# Altium schematic symbol library Displays.SchLib: 4 symbols
Pins are listed as number, name and electrical type; pins without a type are passive.

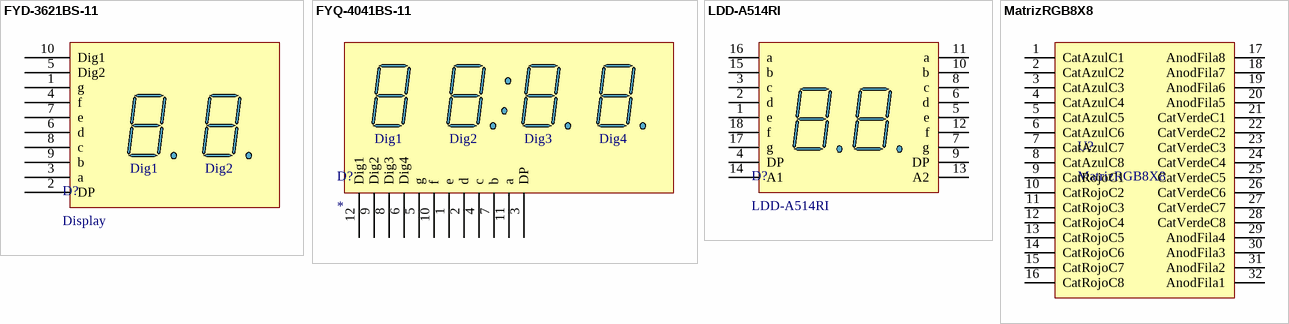
[diagram p0: symbols FYD-3621BS-11 to MatrizRGB8X8]

## FYD-3621BS-11
designator D?, comment Display
footprint FYD-3621BS-11
pins: 1 g, 2 DP, 3 a, 4 f, 5 Dig2, 6 d, 7 e, 8 c, 9 b, 10 Dig1

## FYQ-4041BS-11
designator D?
footprint FYQ-4041BS-11
pins: 1 e, 2 d, 3 DP, 4 c, 5 g, 6 Dig4, 7 b, 8 Dig3, 9 Dig2, 10 f, 11 a, 12 Dig1

## LDD-A514RI
designator D?
DISPLAY 2 DIG ANODO COMUN
footprint DISPLAY7x2_1
pins: 1 e "Anode", 2 d "Anode", 3 c "Anode", 4 DP "Anode", 5 e "Anode", 6 d "Anode", 7 g "Anode", 8 c "Anode", 9 DP "Anode", 10 b "Anode", 11 a "Anode", 12 f "Anode", 13 A2 "Common Cathode", 14 A1 "Common Cathode", 15 b "Anode", 16 a "Anode", 17 g "Anode", 18 f "Anode"

## MatrizRGB8X8
designator U?
footprint MatrizRGB8X8
pins: 1 CatAzulC1, 2 CatAzulC2, 3 CatAzulC3, 4 CatAzulC4, 5 CatAzulC5, 6 CatAzulC6, 7 CatAzulC7, 8 CatAzulC8, 9 CatRojoC1, 10 CatRojoC2, 11 CatRojoC3, 12 CatRojoC4, 13 CatRojoC5, 14 CatRojoC6, 15 CatRojoC7, 16 CatRojoC8, 17 AnodFila8, 18 AnodFila7, 19 AnodFila6, 20 AnodFila5, 21 CatVerdeC1, 22 CatVerdeC2, 23 CatVerdeC3, 24 CatVerdeC4, 25 CatVerdeC5, 26 CatVerdeC6, 27 CatVerdeC7, 28 CatVerdeC8, 29 AnodFila4, 30 AnodFila3, 31 AnodFila2, 32 AnodFila1